# Altium footprint library MAJ library.PcbLib: 43 footprints (part 2 of 3)
Each footprint in its own frame and in the unit in brackets; x right, y up, seen from the top. Pads: shape width x height; smd on the part's side, far side on the other; paste and mask are expansions set on the pad; w line width, h text height; cw(c..) or ccw(c..) is an arc to the next point about the centre after c.
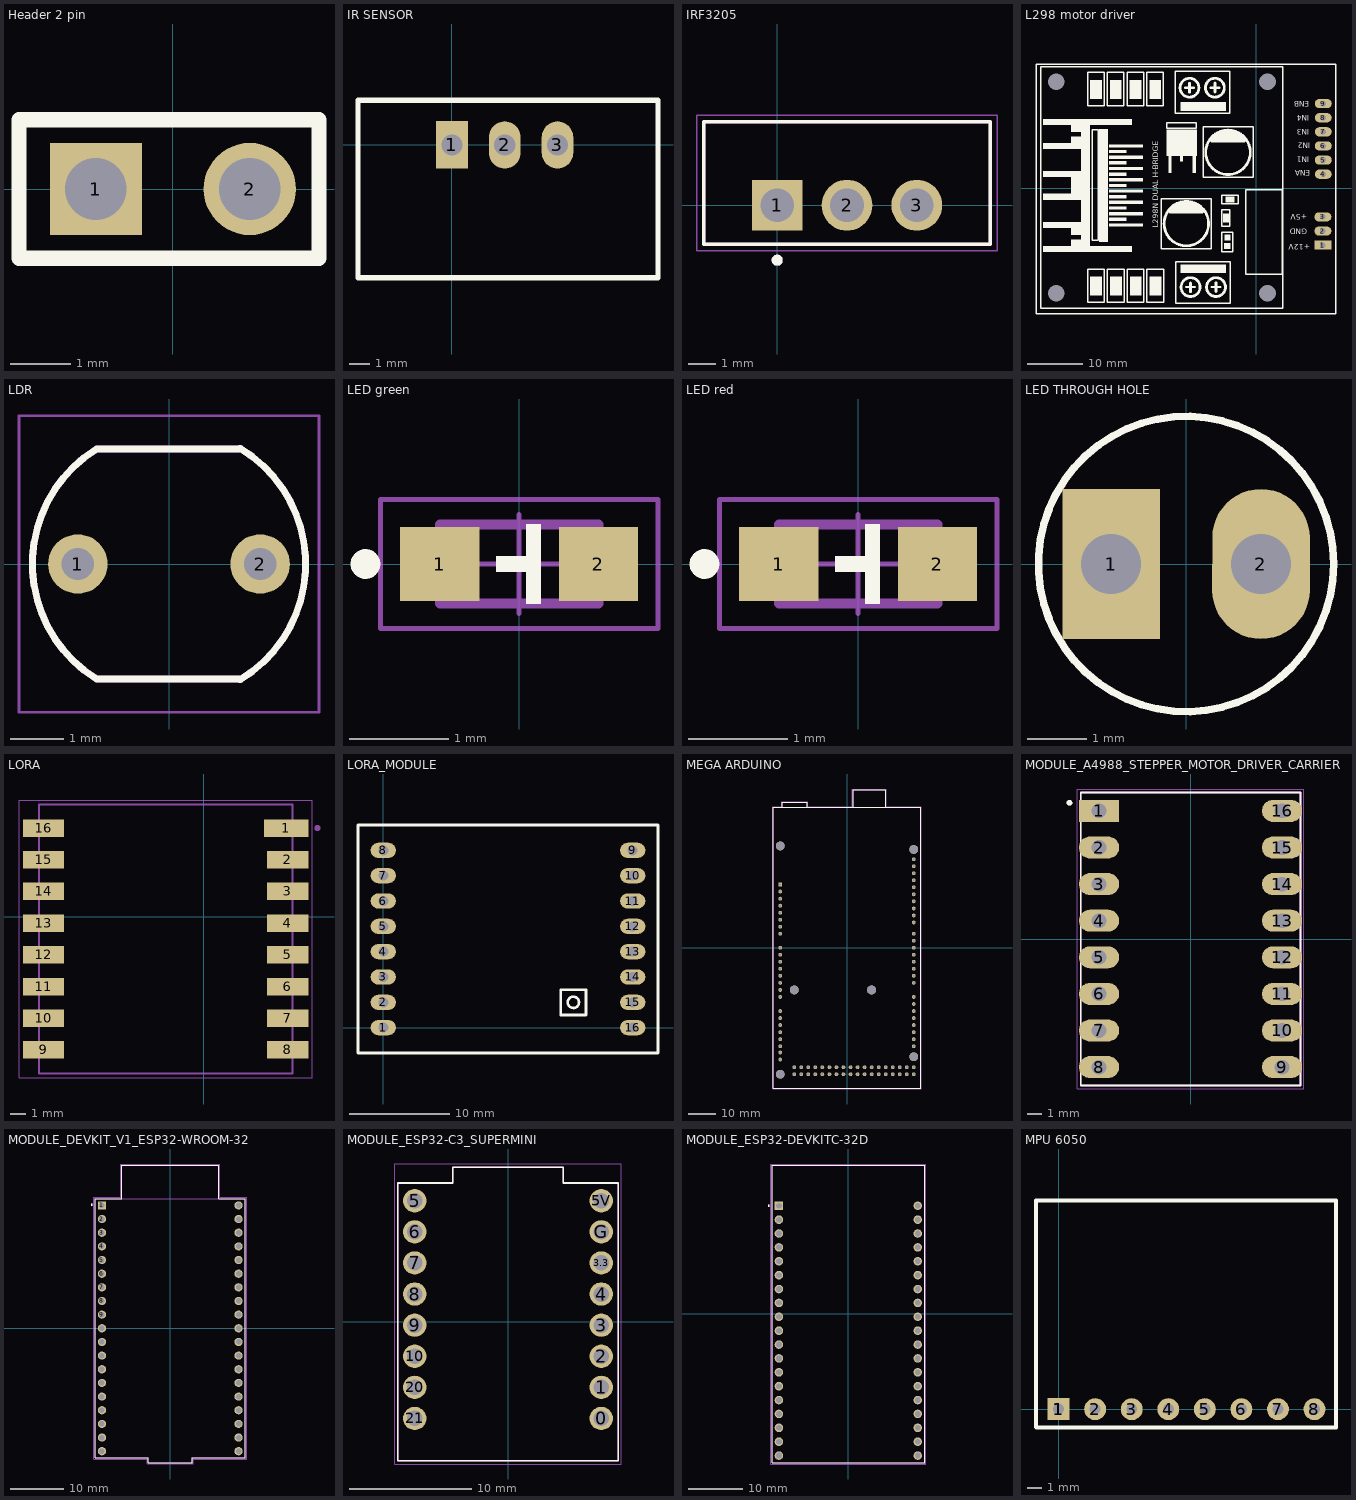
[diagram p1: the footprints below, top view; thin cyan lines are the x and y axes]

## Header 2 pin [mil]
pads (2):
  rect 60x60 hole 40: 1(-50,0)
  round 60 hole 40: 2(50,0)
Top Overlay:
  lines w10: -100,-45 95,-45 95,45 -100,45 -100,-45
Mechanical 1:
  text "'.Designator" at -279,132.99 h60
3D body "640457-2.step": height 230, standoff -140, extent -100,-15 100,420

## IR SENSOR [mil]
pads (3):
  rect 60x90 hole 40: 1(0,0)
  oval 60x90 hole 40: 2(100,0) 3(200,0)
Top Overlay:
  lines w10: -178.17,-251.56 -178.17,84.63 390.51,84.63 390.51,-251.56 -178.17,-251.56
3D body "Infrared Sensor.SLDPRT": height 1492.76, standoff -267.09, extent -175,-248.2 395.87,88.2

## IRF3205 [mm]
height 4.69
pads (3):
  rect 1.85x1.85 / inner round 1.85 / far side rect 1.85x1.85 hole 1.23: 1(0,0)
  round 1.85 hole 1.23: 2(2.54,0) 3(5.08,0)
Top Overlay:
  circle w0.2: c0,-2 r0.1
  lines w0.127: -2.668,-1.412 7.748,-1.412 7.748,3.033 -2.668,3.033 -2.668,-1.412
Mechanical 13:
  circle w0.2: c0,-2 r0.1
  lines w0.127: -2.668,-1.412 7.748,-1.412 7.748,3.033 -2.668,3.033 -2.668,-1.412
Mechanical 15:
  lines w0.05: -2.917,-1.662 7.997,-1.662 7.997,3.283 -2.917,3.283 -2.917,-1.662
3D body "step_temp.STEP": height 19.3, standoff -10.03, extent -2.667,-1.397 7.747,3.048

## L298 motor driver [mil]
pads (13):
  rect 120x65 hole 40 paste+0 mask+4: 1(472.31,-402.69)
  oval 120x65 hole 40 paste+0 mask+4: 2(472.31,-302.69) 3(472.31,-202.69) 4(475,100) 5(475,200) 6(475,300) 7(475,400) 8(475,500) 9(475,600)
  round 60 hole 118.11: " "(-1417,-743) " "(-1417,754) " "(80,-743) " "(80,754)
Top Overlay:
  drawing of 153 lines, arcs and shapes, not listed
  text "L298N DUAL H-BRIDGE" at -694.99,-280 h40
  text "+5V" at 362,-183 h40
  text "GND" at 362,-288 h40
  text "+12V" at 382,-398 h40
  text "ENB" at 377,617 h40
  text "IN4" at 377,517 h40
  text "IN3" at 377,417 h40
  text "IN2" at 382,322 h40
  text "IN1" at 377,222 h40
  text "ENA" at 382,127 h40
3D body "L298N_M.STEP": height 1045.7, standoff -116.11, extent -1541,-866.88 203.88,878
3D body "TS-106-T-G-1.stp": height 312, standoff -196, extent 425,46 525,654
3D body "TS-103-T-G-1.stp": height 312, standoff -196, extent 422.3,-456.68 522.3,-148.68

## LDR [mm]
height 2.38
pads (2):
  round 1.108 hole 0.6: 1(-1.7,0) 2(1.7,0)
Top Overlay:
  lines w0.127: -1.364,-2.133 cw(c-0.031,0) -1.364,2.133 ; -1.345,-2.145 1.345,-2.145 ; -1.345,2.145 1.345,2.145 ; 1.326,-2.156 ccw(c0.031,0) 1.326,2.156
Mechanical 13:
  lines w0.127: -1.364,-2.133 cw(c-0.031,0) -1.364,2.133 ; -1.345,-2.145 1.345,-2.145 ; -1.345,2.145 1.345,2.145 ; 1.326,-2.156 ccw(c0.031,0) 1.326,2.156
Mechanical 15:
  lines w0.05: -2.796,-2.766 2.796,-2.766 2.796,2.766 -2.796,2.766 -2.796,-2.766
3D body "step_temp.STEP": height 2.39, standoff -25.98, extent -2.54,-2.146 2.54,2.146

## LED green [mm] "SMD Mono-color Chip LED, body 1.6x0.8mm"
height 0.4
pads (2):
  rect 0.8x0.75 smd: 1(-0.8,0) 2(0.8,0)
Top Overlay:
  circle w0.15: c-1.55,0 r0.075
  region: 0.22,0.4 0.22,-0.4 0.07,-0.4 0.07,-0.08 -0.23,-0.08 -0.23,0.08 0.07,0.08 0.07,0.4
Top Courtyard:
  lines w0.05: -1.4,-0.65 1.4,-0.65 1.4,0.65 -1.4,0.65 -1.4,-0.65
Top Designator:
  text ".Designator" at -2.499,-0.167 h0.5
Top Component Outline:
  region: 0.22,0.4 0.22,-0.4 0.07,-0.4 0.07,-0.08 -0.23,-0.08 -0.23,0.08 0.07,0.08 0.07,0.4
  lines w0.1: -0.8,-0.4 0.8,-0.4 0.8,0.4 -0.8,0.4 -0.8,-0.4
Top Component Center:
  lines w0.05: -0.5,0 0.5,0 ; 0,-0.5 0,0.5
3D body "everlight-17-21-0805LED-GREEN.step": height 1.12, standoff 0.01, extent -1,-0.615 1,0.635

## LED red [mm] "SMD Mono-color Chip LED, body 1.6x0.8mm"
height 0.4
pads (2):
  rect 0.8x0.75 smd: 1(-0.8,0) 2(0.8,0)
Top Overlay:
  circle w0.15: c-1.55,0 r0.075
  region: 0.22,0.4 0.22,-0.4 0.07,-0.4 0.07,-0.08 -0.23,-0.08 -0.23,0.08 0.07,0.08 0.07,0.4
Top Courtyard:
  lines w0.05: -1.4,-0.65 1.4,-0.65 1.4,0.65 -1.4,0.65 -1.4,-0.65
Top Designator:
  text ".Designator" at -2.499,-0.167 h0.5
Top Component Outline:
  region: 0.22,0.4 0.22,-0.4 0.07,-0.4 0.07,-0.08 -0.23,-0.08 -0.23,0.08 0.07,0.08 0.07,0.4
  lines w0.1: -0.8,-0.4 0.8,-0.4 0.8,0.4 -0.8,0.4 -0.8,-0.4
Top Component Center:
  lines w0.05: -0.5,0 0.5,0 ; 0,-0.5 0,0.5
3D body "User Library-LED-0805-R.step": height 1.1, standoff 0, extent -1,-0.625 1,0.625

## LED THROUGH HOLE [mil]
pads (2):
  rect 65x100 / inner round 59.37 / far side rect 59.37x59.37 hole 40: 1(-50,0)
  oval 65x100 hole 40: 2(50,0)
Top Overlay:
  circle w5: c0,0 r98.43
3D body "step_temp.STEP": height 377.95, standoff -1023.62, extent -98.43,-116.14 116.14,116.14

## LORA [mm]
pads (16):
  rect 2.8x1.1 smd: 1(5.187,5.603)
  rect 2.6x1.1 smd: 2(5.287,3.603) 3(5.287,1.603) 4(5.287,-0.397) 5(5.287,-2.397) 6(5.287,-4.397) 7(5.287,-6.397) 8(5.287,-8.397) 9(-10.113,-8.397) 10(-10.113,-6.397) 11(-10.113,-4.397) 12(-10.113,-2.397) 13(-10.113,-0.397) 14(-10.113,1.603) 15(-10.113,3.603) 16(-10.113,5.603)
Bottom Overlay:
  circle w0.2: c7.163,5.603 r0.1
  lines w0.127: -10.413,-9.897 5.587,-9.897 ; -10.413,7.103 5.587,7.103
Mechanical 13:
  circle w0.2: c7.163,5.603 r0.1
  lines w0.127: -10.413,-9.897 -10.413,7.103 5.587,7.103 5.587,-9.897 -10.413,-9.897
Mechanical 15:
  lines w0.05: -11.663,-10.147 -11.663,7.353 6.837,7.353 6.837,-10.147 -11.663,-10.147
3D body "Ra-02 LoRa--3DModel-STEP-1.STEP": height -0.38, standoff -3.68, extent -10.414,-9.897 5.586,7.103

## LORA_MODULE [mil]
pads (16):
  oval 100x60 hole 40: 1(0,0) 2(0,100) 3(0,200) 4(0,300) 5(0,400) 6(0,500) 7(0,600) 8(0,700) 9(984.25,700) 10(984.25,600) 11(984.25,500) 12(984.25,400) 13(984.25,300) 14(984.25,200) 15(984.25,100) 16(984.25,0)
Top Overlay:
  circle w10: c750,100 r22.36
  lines w10: -100,-100 -100,800 0,800 984.25,800 1084.25,800 1084.25,-100 984.25,-100 0,-100 -100,-100 ; 700,50 800,50 800,150 700,150 700,50
3D body "lora-ra-02-ai-thinker (1).STEP": height 177.66, standoff -3.44, extent -59.21,-51.57 1039.21,751.57

## MEGA ARDUINO [mm]
pads (92):
  round 1.358 hole 0.85: 0(24.13,-12.7) 1(24.13,-10.16) 2(24.13,-7.62) 3(24.13,-5.08) 3V3(-24.13,15.24) 4(24.13,-2.54) 5(24.13,0) 5V_1(-24.13,12.7) 5V_2(24.13,-43.18) 5V_3(24.13,-45.72) 6(24.13,2.54) 7(24.13,5.08) 8(24.13,9.144) 9(24.13,11.684) 10(24.13,14.224) 11(24.13,16.764) 12(24.13,19.304) 13(24.13,21.844) 14(24.13,-17.78) 15(24.13,-20.32) 16(24.13,-22.86) 17(24.13,-25.4) 18(24.13,-27.94) 19(24.13,-30.48) 20(24.13,-33.02) 21(24.13,-35.56) 22(21.59,-43.18) 23(21.59,-45.72) 24(19.05,-43.18) 25(19.05,-45.72) 26(16.51,-43.18) 27(16.51,-45.72) 28(13.97,-43.18) 29(13.97,-45.72) 30(11.43,-43.18) 31(11.43,-45.72) 32(8.89,-43.18) 33(8.89,-45.72) 34(6.35,-43.18) 35(6.35,-45.72) 36(3.81,-43.18) 37(3.81,-45.72) 38(1.27,-43.18) 39(1.27,-45.72) 40(-1.27,-43.18) 41(-1.27,-45.72) 42(-3.81,-43.18) 43(-3.81,-45.72) 44(-6.35,-43.18) 45(-6.35,-45.72) 46(-8.89,-43.18) 47(-8.89,-45.72) 48(-11.43,-43.18) 49(-11.43,-45.72) 50(-13.97,-43.18) 51(-13.97,-45.72) 52(-16.51,-43.18) 53(-16.51,-45.72) AD0(-24.13,0) AD1(-24.13,-2.54) AD2(-24.13,-5.08) AD3(-24.13,-7.62) AD4(-24.13,-10.16) AD5(-24.13,-12.7) AD6(-24.13,-15.24) AD7(-24.13,-17.78) AD8(-24.13,-22.86) AD9(-24.13,-25.4) AD10(-24.13,-27.94) AD11(-24.13,-30.48) AD12(-24.13,-33.02) AD13(-24.13,-35.56) AD14(-24.13,-37.846) AD15(-24.13,-40.386) AREF(24.13,26.924) GND1(-24.13,10.16) GND2(-24.13,7.62) GND3(24.13,24.384) GND4(-19.05,-43.18) GND5(-19.05,-45.72) IOREF(-24.13,20.32) RESET(-24.13,17.78) SCL(24.13,32.004) SDA(24.13,29.464) VIN(-24.13,5.08)
  rect 1.358x1.358 / inner round 1.358 / far side rect 1.358x1.358 hole 0.85: NC(-24.13,22.86)
  round 3.2 hole 3.2 unplated: ""(-24.13,-45.72) ""(-24.13,36.83) ""(-19.05,-15.24) ""(8.89,-15.24) ""(24.13,-39.37) ""(24.13,35.56)
Top Overlay:
  lines w0.127: -23.37,50.8 -26.67,50.8 -26.67,-50.8 26.67,-50.8 26.67,50.8 14.02,50.8 ; -23.37,50.8 -14.378,50.8 ; -23.37,50.8 -23.37,52.61 -14.378,52.61 -14.378,50.8 ; -14.378,50.8 2.22,50.8 ; 2.22,50.8 14.02,50.8 ; 2.22,50.8 2.22,57.15 14.02,57.15 14.02,50.8
Mechanical 13:
  lines w0.127: -23.37,50.8 -26.67,50.8 -26.67,-50.8 26.67,-50.8 26.67,50.8 14.02,50.8 ; -23.37,50.8 -14.378,50.8 ; -23.37,50.8 -23.37,52.61 -14.378,52.61 -14.378,50.8 ; -14.378,50.8 2.22,50.8 ; 2.22,50.8 14.02,50.8 ; 2.22,50.8 2.22,57.15 14.02,57.15 14.02,50.8
Mechanical 15:
  lines w0.05: -26.92,-51.05 26.92,-51.05 26.92,51.05 14.27,51.05 14.27,57.4 1.97,57.4 1.97,51.05 -14.128,51.05 -14.128,52.86 -23.62,52.86 -23.62,51.05 -26.92,51.05 -26.92,-51.05
3D body "step_temp.STEP": height 13.23, standoff -3, extent -26.5,-51 26.5,57

## MODULE_A4988_STEPPER_MOTOR_DRIVER_CARRIER [mil]
pads (16):
  rect 110x60 hole 40: 1(-250,350)
  oval 110x60 hole 40: 2(-250,250) 3(-250,150) 4(-250,50) 5(-250,-50) 6(-250,-150) 7(-250,-250) 8(-250,-350) 9(250,-350) 10(250,-250) 11(250,-150) 12(250,-50) 13(250,50) 14(250,150) 15(250,250) 16(250,350)
Top Overlay:
  circle w7.87: c-330.71,372.05 r3.94
  lines w5: -300,-400 -300,400 300,400 300,-400 -300,-400
Mechanical 13:
  circle w7.87: c-330.71,372.05 r3.94
  lines w5: -300,-400 -300,400 300,400 300,-400 -300,-400
Mechanical 15:
  lines w1.97: -309.84,-409.84 309.84,-409.84 309.84,409.84 -309.84,409.84 -309.84,-409.84
3D body "A4988 STEPPER MOTOR DRIVER CARRIER--3DModel-STEP-56544.STEP": height 232, standoff -236, extent -297,-404 303,396

## MODULE_DEVKIT_V1_ESP32-WROOM-32 [mm]
pads (38):
  rect 1.53x1.53 / inner round 1.53 / far side rect 1.53x1.53 hole 1.02: 1(-12.7,22.85)
  round 1.53 hole 1.02: 2(-12.7,20.31) 3(-12.7,17.77) 4(-12.7,15.23) 5(-12.7,12.69) 6(-12.7,10.15) 7(-12.7,7.61) 8(-12.7,5.07) 9(-12.7,2.53) 10(-12.7,-0.01) 11(-12.7,-2.55) 12(-12.7,-5.09) 13(-12.7,-7.63) 14(-12.7,-10.17) 15(-12.7,-12.71) 16(-12.7,-15.25) 17(-12.7,-17.79) 18(-12.7,-20.33) 19(-12.7,-22.87) 20(12.7,-22.87) 21(12.7,-20.33) 22(12.7,-17.79) 23(12.7,-15.25) 24(12.7,-12.71) 25(12.7,-10.17) 26(12.7,-7.63) 27(12.7,-5.09) 28(12.7,-2.55) 29(12.7,-0.01) 30(12.7,2.53) 31(12.7,5.07) 32(12.7,7.61) 33(12.7,10.15) 34(12.7,12.69) 35(12.7,15.23) 36(12.7,17.77) 37(12.7,20.31) 38(12.7,22.85)
Top Overlay:
  circle w0.2: c-14.57,22.97 r0.1
  lines w0.127: -13.95,-24.1 -4.07,-24.1 -4.07,-25 4.06,-25 4.06,-24.1 13.95,-24.1 13.95,24.1 9,24.1 9,30.3 -9,30.3 -9,24.1 -13.95,24.1 -13.95,-24.1
Mechanical 13:
  circle w0.2: c-14.57,22.97 r0.1
  lines w0.127: -9,24.1 -9,30.3 9,30.3 9,24.1 ; -9,24.1 -13.95,24.1 -13.95,-24.1 -4.07,-24.1 -4.07,-25 4.06,-25 4.06,-24.1 13.95,-24.1 13.95,24.1 9,24.1 ; -9,24.1 9,24.1
Mechanical 15:
  lines w0.05: -14.2,-24.38 -4.32,-24.38 -4.32,-25.25 4.31,-25.25 4.31,-24.38 14.2,-24.38 14.2,24.38 9.25,24.38 9.25,30.55 -9.25,30.55 -9.25,24.38 -14.2,24.38 -14.2,-24.38
3D body "EPS Wroom 3.2 ESP-32S.stp": height 3.92, standoff -8.77, extent -13.846,-24.517 14.354,27.178

## MODULE_ESP32-C3_SUPERMINI [mm]
height 4.2
pads (16):
  round 1.905 hole 1.27: 0(7.62,-7.88) 1(7.62,-5.34) 2(7.62,-2.8) 3(7.62,-0.26) 3.3(7.62,4.82) 4(7.62,2.28) 5(-7.62,9.9) 5V(7.62,9.9) 6(-7.62,7.36) 7(-7.62,4.82) 8(-7.62,2.28) 9(-7.62,-0.26) 10(-7.62,-2.8) 20(-7.62,-5.34) 21(-7.62,-7.88) G(7.62,7.36)
Top Overlay:
  lines w0.127: -9,-11.35 9,-11.35 9,11.35 4.5,11.35 4.5,12.65 -4.5,12.65 -4.5,11.35 -9,11.35 -9,-11.35
Mechanical 13:
  lines w0.127: -9,-11.35 9,-11.35 9,11.35 4.5,11.35 4.5,12.65 -4.5,12.65 -4.5,11.35 -9,11.35 -9,-11.35
Mechanical 15:
  lines w0.05: -9.25,-11.6 9.25,-11.6 9.25,12.9 -9.25,12.9 -9.25,-11.6
3D body "ESP32-C3 SuperMini.SLDPRT": height 3.86, standoff 0.01, extent -8.942,-11.061 9.068,12.839

## MODULE_ESP32-DEVKITC-32D [mm]
pads (38):
  rect 1.56x1.56 / inner round 1.56 / far side rect 1.56x1.56 hole 1.04: J2-1(-12.7,19.76)
  round 1.56 hole 1.04: J2-2(-12.7,17.22) J2-3(-12.7,14.68) J2-4(-12.7,12.14) J2-5(-12.7,9.6) J2-6(-12.7,7.06) J2-7(-12.7,4.52) J2-8(-12.7,1.98) J2-9(-12.7,-0.56) J2-10(-12.7,-3.1) J2-11(-12.7,-5.64) J2-12(-12.7,-8.18) J2-13(-12.7,-10.72) J2-14(-12.7,-13.26) J2-15(-12.7,-15.8) J2-16(-12.7,-18.34) J2-17(-12.7,-20.88) J2-18(-12.7,-23.42) J2-19(-12.7,-25.96) J3-1(12.7,19.76) J3-2(12.7,17.22) J3-3(12.7,14.68) J3-4(12.7,12.14) J3-5(12.7,9.6) J3-6(12.7,7.06) J3-7(12.7,4.52) J3-8(12.7,1.98) J3-9(12.7,-0.56) J3-10(12.7,-3.1) J3-11(12.7,-5.64) J3-12(12.7,-8.18) J3-13(12.7,-10.72) J3-14(12.7,-13.26) J3-15(12.7,-15.8) J3-16(12.7,-18.34) J3-17(12.7,-20.88) J3-18(12.7,-23.42) J3-19(12.7,-25.96)
Top Overlay:
  circle w0.2: c-14.6,19.76 r0.1
  lines w0.127: -13.95,-27.25 13.95,-27.25 13.95,27.15 -13.95,27.15 -13.95,-27.25
Mechanical 13:
  circle w0.2: c-14.6,19.76 r0.1
  lines w0.127: -13.95,-27.25 -13.95,27.15 13.95,27.15 13.95,-27.25 -13.95,-27.25
Mechanical 15:
  lines w0.05: -14.2,-27.5 -14.2,27.4 14.2,27.4 14.2,-27.5 -14.2,-27.5
3D body "step_temp.STEP": height 6.69, standoff -6, extent -13.97,-27.9 13.97,27.2

## MPU 6050 [mil]
pads (9):
  round 60 hole 30: 1(0,0) 2(100,0) 3(200,0) 4(300,0) 5(400,0) 6(500,0) 7(600,0) 8(700,0)
  rect 60x60 hole 30: 1(0,0)
Top Overlay:
  lines w10: -62,-49 -62,571 759,571 759,-50 -61,-50 -62,-49
3D body "MPU.stp": height 208.74, standoff -226.3, extent -64.77,-55 762,574.92